# Altium footprint library 5034802400.PcbLib: 1 footprints
Each footprint in its own frame and in the unit in brackets; x right, y up, seen from the top. Pads: shape width x height; smd on the part's side, far side on the other; paste and mask are expansions set on the pad; w line width, h text height; cw(c..) or ccw(c..) is an arc to the next point about the centre after c.
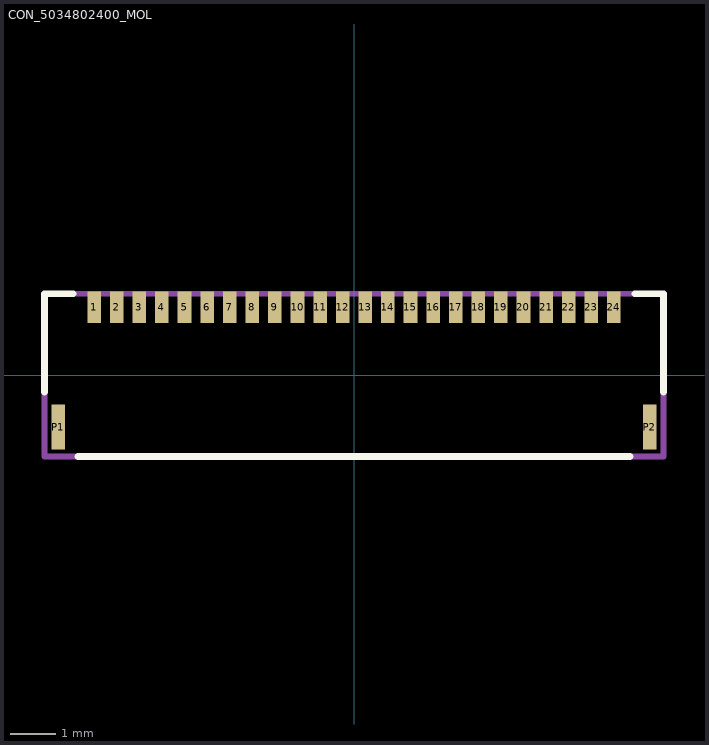
[diagram p0: the footprint, top view; thin cyan lines are the x and y axes]

## CON_5034802400_MOL [mm]
pads (26):
  rect 0.3x0.7 smd paste+0 mask+0.076: 1(-5.75,1.5) 2(-5.25,1.5) 3(-4.75,1.5) 4(-4.25,1.5) 5(-3.75,1.5) 6(-3.25,1.5) 7(-2.75,1.5) 8(-2.25,1.5) 9(-1.75,1.5) 10(-1.25,1.5) 11(-0.75,1.5) 12(-0.25,1.5) 13(0.25,1.5) 14(0.75,1.5) 15(1.25,1.5) 16(1.75,1.5) 17(2.25,1.5) 18(2.75,1.5) 19(3.25,1.5) 20(3.75,1.5) 21(4.25,1.5) 22(4.75,1.5) 23(5.25,1.5) 24(5.75,1.5)
  rect 0.3x1 smd paste+0 mask+0.076: P1(-6.54,-1.15) P2(6.54,-1.15)
Top Overlay:
  lines w0.152: -6.85,-0.373 -6.85,1.8 -6.22,1.8 ; -6.107,-1.8 6.107,-1.8 ; 6.22,1.8 6.85,1.8 6.85,-0.373
Mechanical 13:
  lines w0.127: -6.85,-1.8 -6.85,1.8 6.85,1.8 6.85,-1.8 -6.85,-1.8
3D body "503480-2400.stp": height 1.85, standoff -0.02, extent -6.85,-1.8 6.85,1.8